# Altium schematic symbol library Capacitor.SchLib: 735 symbols (part 11 of 20)
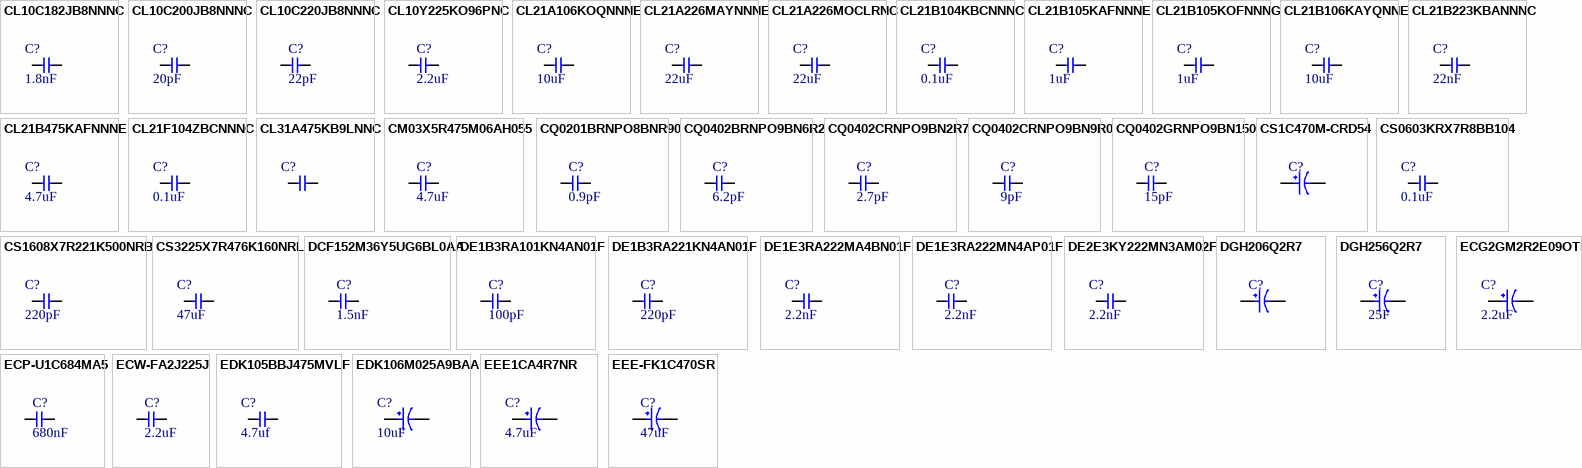
[diagram p28: symbols CL10C182JB8NNNC to EEE-FK1C470SR]

## CL31A475KB9LNNC
designator C?
CAP CER 4.7UF 50V X5R 1206; Manufacturer: Samsung; Manufacturer Part Number: CL31A475KB9LNNC; Tolerance: 10%; Item Type: Capacitor; Supplier: Avnet; Supplier Part Number: CL31A475KB9LNNC; RoHS: Yes; Category: Ceramic Capacitors; Stock: 176000; Pricing: 4000=0.09189, 8000=0.08978, 16000=0.08767, 24000=0.08555, 32000=0.08344 (USD); Mounting Technology: Surface Mount; Case/Package: Ceramic; Case Code (Metric): 3216; Case Code (Imperial): 1206; Min Operating Temperature: -55°C; Max Operating Temperature: 85°C; Packaging: Tape and Reel; Value: 4.7uF; Voltage Rating: 50V; Dielectric: X5R; Series: CL; Package Quantity: 1; Length: 3.2mm; Width: 0.063inch; Depth: 1.6mm; Thickness: 0.039inch; Radiation Hardening: No; RoHS Compliant: Yes; ComponentLink1URL: https://datasheet.ciiva.com/25727/cl31a475kb9lnnc-25727168.pdf?src-supplier=Digi-Key; ComponentLink1Description: https://datasheet.ciiva.com/25727/cl31a475kb9lnnc-25727168.pdf?src-supplier=Digi-Key; ComponentLink2URL: https://datasheet.ciiva.com/26838/getdatasheetpartid-359646-26838869.pdf?src-supplier=Verical; ComponentLink2Description: https://datasheet.ciiva.com/26838/getdatasheetpartid-359646-26838869.pdf?src-supplier=Verical; LCSC Part Number: C318753
footprint Cap-1206 (SMD 1206)
pins: 1, 2

## CM03X5R475M06AH055
designator C?, comment 4.7uF
CAP CER 4.7UF 6.3V X5R 0201; Manufacturer: Kyocera AVX; Manufacturer Part Number: CM03X5R475M06AH055; Item Type: Capacitor; Supplier: Arrow Electronics; Supplier Part Number: CM03X5R475M06AH055; RoHS: Yes; Category: Ceramic Capacitors; Stock: 1730; Pricing: 1=0.32, 10=0.216, 25=0.1842, 100=0.1171, 250=0.1159, 500=0.1132, 1000=0.0679 (USD); LCSC Part Number: C253012
footprint CAP-0201
pins: 1, 2

## CQ0201BRNPO8BNR90
designator C?, comment 0.9pF
CAP CER 0.9PF 25V C0G/NPO 0201; Manufacturer: Yageo; Manufacturer Part Number: CQ0201BRNPO8BNR90; Item Type: Capacitor; Supplier: Digikey; Supplier Part Number: 13-CQ0201BRNPO8BNR90TR-ND; RoHS: Yes; Category: Ceramic Capacitors; Pricing: 15000=0.01368 (USD); LCSC Part Number: C513692
footprint CAP-0201
pins: 1, 2

## CQ0402BRNPO9BN6R2
designator C?, comment 6.2pF
CAP CER 6.2PF 50V C0G/NPO 0402; Manufacturer: Yageo; Manufacturer Part Number: CQ0402BRNPO9BN6R2; Item Type: Capacitor; Supplier: Digikey; Supplier Part Number: 13-CQ0402BRNPO9BN6R2CT-ND; RoHS: Yes; Category: Ceramic Capacitors; Stock: 56222; Pricing: 1=0.18, 10=0.12, 50=0.0716, 100=0.0563, 500=0.04158, 1000=0.03443, 2500=0.03204, 5000=0.02932 (USD); Mounting Technology: Surface Mount; Case/Package: 0402; Min Operating Temperature: -55°C; Max Operating Temperature: 125°C; Packaging: Tape and Reel; Value: 6.2pF; Voltage Rating: 50V; Series: CQ; ComponentLink1URL: http://www.yageo.com/NewPortal/_en/search/productDocs.jsp?YageoPartNumber=CQ0402BRNPO9BN6R2&src-supplier=Digikey; ComponentLink1Description: http://www.yageo.com/NewPortal/_en/search/productDocs.jsp?YageoPartNumber=CQ0402BRNPO9BN6R2&src-supplier=Digikey; LCSC Part Number: C577385
footprint Cap-0402
pins: 1, 2

## CQ0402CRNPO9BN2R7
designator C?, comment 2.7pF
CAP CER 2.7PF 50V C0G/NPO 0402; Manufacturer: Yageo; Manufacturer Part Number: CQ0402CRNPO9BN2R7; Item Type: Capacitor; Supplier: Mouser; Supplier Part Number: 603-CQ0402CNPO9BN2R7; RoHS: No; Stock: 19985; Pricing: 1=0.1, 10=0.044, 50=0.044, 100=0.026, 1000=0.017, 10000=0.013 (USD); LCSC Part Number: C1855210
footprint Cap-0402
pins: 1, 2

## CQ0402CRNPO9BN9R0
designator C?, comment 9pF
CAP CER 9PF 50V C0G/NPO 0402; Manufacturer: Yageo; Manufacturer Part Number: CQ0402CRNPO9BN9R0; Item Type: Capacitor; Supplier: Digikey; Supplier Part Number: CQ0402CRNPO9BN9R0-ND; RoHS: Yes; Category: Ceramic Capacitors; Pricing: 10000=0.02594 (USD); Mounting Technology: Surface Mount; Case/Package: 0402; Min Operating Temperature: -55°C; Max Operating Temperature: 125°C; Packaging: Tape and Reel; Value: 9pF; Voltage Rating: 50V; Series: CQ; ComponentLink1URL: http://www.yageo.com/documents/recent/UPY-High%20Q_NP0_16V-to-250V_13.pdf?src-supplier=Digikey; ComponentLink1Description: http://www.yageo.com/documents/recent/UPY-High%20Q_NP0_16V-to-250V_13.pdf?src-supplier=Digikey; LCSC Part Number: C577403
footprint Cap-0402
pins: 1, 2

## CQ0402GRNPO9BN150
designator C?, comment 15pF
CAP CER 15PF 50V C0G/NPO 0402; Manufacturer: Yageo; Manufacturer Part Number: CQ0402GRNPO9BN150; Item Type: Capacitors; Tolerance: 2%; Dielectric: C0G; Supplier: Digikey; LCSC Part Number: C577406; RoHS: Yes; Pricing: 10000=0.04366 (USD); Mounting Technology: Surface Mount; Case/Package: 0402; Case Code (Imperial): 0402; Case Code (Metric): 1005; Weight: 2.3E-05oz; Min Operating Temperature: -55°C; Max Operating Temperature: 125°C; Value: 15pF; Packaging: Tape and Reel; Voltage Rating: 50V; Voltage Rating (DC): 50V; Package Quantity: 10000; Series: CQ; ComponentLink1URL: http://www.mouser.com/ds/2/447/UPY-High%20Q_NP0_16V-to-250V_11-533944.pdf?src-supplier=Mouser; ComponentLink1Description: http://www.mouser.com/ds/2/447/UPY-High%20Q_NP0_16V-to-250V_11-533944.pdf?src-supplier=Mouser; ComponentLink2URL: http://www.yageo.com/documents/recent/UPY-High%20Q_NP0_16V-to-250V_13.pdf?src-supplier=Digikey; ComponentLink2Description: http://www.yageo.com/documents/recent/UPY-High%20Q_NP0_16V-to-250V_13.pdf?src-supplier=Digikey
footprint Cap-0402
pins: 1, 2

## CS1C470M-CRD54
designator C?
47uF 16V ±20% SMD,D5xL5.4mm Aluminum Electrolytic Capacitors - SMD ROHS; Manufacturer: ST(Semtech); Manufacturer Part Number: CS1C470M-CRD54; Package: SMD,D5xL5.4mm; LCSC Part Number: C96178; Item Type: Capacitors; ComponentLink1Description: LCSC; ComponentLink1URL: https://www.lcsc.com/product-detail/Aluminum-Electrolytic-Capacitors-SMD_ST-Semtech-CS1C470M-CRD54_C96178.html
footprint CS1C470M-CRD54
pins: 1, 2

## CS0603KRX7R8BB104
designator C?, comment 0.1uF
CS Series 0603 0.1 uF 25 V ±10% X7R Multilayer Ceramic Capacitor; Manufacturer: Yageo; Manufacturer Part Number: CS0603KRX7R8BB104; Item Type: Capacitors; Supplier: Avnet; LCSC Part Number: C577419; RoHS: Yes; Stock: 3200; Pricing: 1=0.133, 25=0.092, 50=0.069, 100=0.047 (USD); ComponentLink1URL: https://www.yageo.com/upload/media/product/productsearch/datasheet/mlcc/UPY-ST_NPOX7R_16V-to-3KV_5.pdf?src-supplier=Digi-Key; ComponentLink1Description: https://www.yageo.com/upload/media/product/productsearch/datasheet/mlcc/UPY-ST_NPOX7R_16V-to-3KV_5.pdf?src-supplier=Digi-Key; ComponentLink2URL: https://datasheet.octopart.com/CS0603KRX7R8BB104-Yageo-datasheet-158410602.pdf?src-supplier=Future+Electronics; ComponentLink2Description: https://datasheet.octopart.com/CS0603KRX7R8BB104-Yageo-datasheet-158410602.pdf?src-supplier=Future+Electronics
footprint Cap-0603
pins: 1, 2

## CS1608X7R221K500NRB
designator C?, comment 220pF
50V 220pF X7R ±10% 0603 Multilayer Ceramic Capacitors MLCC - SMD/SMT ROHS; Manufacturer: Samwha Capacitors; Manufacturer Part Number: CS1608X7R221K500NRB; Package: 0603; LCSC Part Number: C5255295; Item Type: Capacitor; ComponentLink1Description: LCSC; ComponentLink1URL: https://www.lcsc.com/product-detail/Multilayer-Ceramic-Capacitors-MLCC-SMD-SMT_Samwha-Capacitor-CS1608X7R221K500NRB_C5255295.html
footprint Cap-0603
pins: 1, 2

## CS3225X7R476K160NRL
designator C?, comment 47uF
16V 47uF X7R ±10% 1210 Multilayer Ceramic Capacitors MLCC - SMD/SMT ROHS; Manufacturer: Samwha Capacitor; Manufacturer part Number: CS3225X7R476K160NRL; Package: 1210; LCSC Part Number: C5440143; Item Type: Capacitor; ComponentLink1Description: LCSC; ComponentLink1URL: https://www.lcsc.com/product-detail/Multilayer-Ceramic-Capacitors-MLCC-SMD-SMT_Samwha-Capacitor-CS3225X7R476K160NRL_C5440143.html
footprint Cap-1210 (SMD 1210)
pins: 1, 2

## DCF152M36Y5UG6BL0AA
designator C?, comment 1.5nF
1.5nF ±20% X1,Y1 Plugin,P=10mm Safety Capacitors ROHS; Manufacturer: SHM; Manufacturer Part Number: DCF152M36Y5UG6BL0AA; Package: Plugin,P=10mm; LCSC Part Number: C2919099; Item Type: Capacitor; ComponentLink1Description: LCSC; ComponentLink1URL: https://www.lcsc.com/product-detail/Safety-Capacitors_SHM-DCF152M36Y5UG6BL0AA_C2919099.html?s_z=n_DE2E3KY152MN3AM02F
footprint DCF152M36Y5UG6BL0AA
pins: 1, 2

## DE1B3RA101KN4AN01F
designator C?, comment 100pF
CAP CER 100PF 250V RADIAL; Manufacturer: Murata; Manufacturer Part Number: DE1B3RA101KN4AN01F; Item Type: Capacitors; Material: 4241ConductorMaterial; Supplier: Mouser; LCSC Part Number: C3285641; RoHS: Yes; Stock: 583; Pricing: 1=0.3, 10=0.147, 50=0.147, 100=0.123, 1000=0.089, 10000=0.061 (USD); Height: 9mm; ComponentLink1URL: https://search.murata.co.jp/Ceramy/image/img/A01X/G101/ENG/DE1_RA_N01F_E.pdf?src-supplier=Digikey; ComponentLink1Description: https://search.murata.co.jp/Ceramy/image/img/A01X/G101/ENG/DE1_RA_N01F_E.pdf?src-supplier=Digikey
footprint DE1B3RA101KN4AN01F
pins: 1, 2

## DE1B3RA221KN4AN01F
designator C?, comment 220pF
CAP CER 220PF 250V RADIAL; Manufacturer: Murata; Manufacturer Part Number: DE1B3RA221KN4AN01F; Item Type: Suppression Capacitor; Supplier: Mouser; LCSC Part Number: C1622503; RoHS: Yes; Stock: 985; Pricing: 1=0.35, 10=0.168, 50=0.168, 100=0.141, 1000=0.107, 10000=0.069 (USD); ComponentLink1URL: https://search.murata.co.jp/Ceramy/image/img/A01X/G101/ENG/DE1_RA_N01F_E.pdf?src-supplier=Digikey; ComponentLink1Description: https://search.murata.co.jp/Ceramy/image/img/A01X/G101/ENG/DE1_RA_N01F_E.pdf?src-supplier=Digikey
footprint DE1B3RA221KN4AN01F
pins: 1, 2

## DE1E3RA222MA4BN01F
designator C?, comment 2.2nF
2200 pF ±20% 250VAC Ceramic Capacitor E Radial, Disc; Manufacturer: Murata; Manufacturer Part Number: DE1E3RA222MA4BN01F; Item Type: Capacitors; Supplier: Mouser; LCSC Part Number: C343981; RoHS: Yes; Stock: 37677; Pricing: 1=0.42, 10=0.271, 50=0.271, 100=0.146, 1000=0.114, 10000=0.097 (USD); ComponentLink1URL: http://www.farnell.com/datasheets/2608335.pdf?src-supplier=Farnell; ComponentLink1Description: http://www.farnell.com/datasheets/2608335.pdf?src-supplier=Farnell; ComponentLink2URL: http://www.farnell.com/datasheets/2608335.pdf?src-supplier=Newark; ComponentLink2Description: http://www.farnell.com/datasheets/2608335.pdf?src-supplier=Newark; ComponentLink3URL: https://datasheet.octopart.com/DE1E3RA222MA4BN01F-Murata-datasheet-166166226.pdf?src-supplier=TME; ComponentLink3Description: https://datasheet.octopart.com/DE1E3RA222MA4BN01F-Murata-datasheet-166166226.pdf?src-supplier=TME
footprint DE1E3RA222MA4BN01F
pins: 1, 2

## DE1E3RA222MN4AP01F
designator C?, comment 2.2nF
CAP CER 2200PF 1.5KV RADIAL; Manufacturer: Murata; Manufacturer Part Number: DE1E3RA222MN4AP01F; Item Type: Capacitors; Supplier: Future Electronics; LCSC Part Number: C1622500; RoHS: Yes; Stock: 1200; Pricing: 600=0.0835, 2400=0.0795, 9000=0.0758, 18000=0.074, 45000=0.0699 (USD); ComponentLink1URL: https://search.murata.co.jp/Ceramy/image/img/A01X/G101/ENG/DE1_RA_P01F_E.pdf?src-supplier=Digikey; ComponentLink1Description: https://search.murata.co.jp/Ceramy/image/img/A01X/G101/ENG/DE1_RA_P01F_E.pdf?src-supplier=Digikey; ComponentLink2URL: http://search.murata.co.jp/Ceramy/image/img/A01X/G101/ENG/DE1_RA_P01F_E.pdf?src-supplier=Digikey; ComponentLink2Description: http://search.murata.co.jp/Ceramy/image/img/A01X/G101/ENG/DE1_RA_P01F_E.pdf?src-supplier=Digikey
footprint DE1E3RA222MN4AP01F
pins: 1, 2

## DE2E3KY222MN3AM02F
designator C?, comment 2.2nF
Cap Ceramic 0.0022uF 250Vac E 20% (8 X 5mm) Radial 7.5mm 125°C Ammo Pack; Manufacturer: Murata; Manufacturer Part Number: DE2E3KY222MN3AM02F; Item Type: Suppression Capacitor; Supplier: Arrow Electronics; Supplier Part Number: DE2E3KY222MN3AM02F; RoHS: Yes; Category: Ceramic Capacitors; Stock: 539100; Pricing: 900=4.7232 (USD); ComponentLink1URL: https://datasheet.ciiva.com/29537/c85e-29537334.pdf?src-supplier=Digi-Key; ComponentLink1Description: https://datasheet.ciiva.com/29537/c85e-29537334.pdf?src-supplier=Digi-Key; ComponentLink2URL: https://datasheet.ciiva.com/41797/l0015e-41797477.pdf?src-supplier=Digi-Key; ComponentLink2Description: https://datasheet.ciiva.com/41797/l0015e-41797477.pdf?src-supplier=Digi-Key; LCSC Part Number: C96464
footprint DE2E3KY222MN3AM02F
pins: 1, 2

## DGH206Q2R7
designator C?
CAPACITOR 20F -10%, +30% 2.7V TH; Manufacturer: Cornell Dubilier; Manufacturer Part Number: DGH206Q2R7; Supplier: Digikey; Supplier Part Number: 338-DGH206Q2R7-ND; RoHS: No; Item Type: Capacitor; Pricing: 1=4.21, 10=2.81, 50=2.2436, 100=2.0669, 500=1.76504, 1000=1.67062, 2500=1.57019, 5000=1.50919 (USD)
footprint DGH206Q2R7
pins: 1, 2

## DGH256Q2R7
designator C?, comment 25F
CAPACITOR 25F -10%, +30% 2.7V TH; Manufacturer: CDE Illinois Capacitor; Manufacturer Part Number: DGH256Q2R7; Supplier: Arrow Electronics; Supplier Part Number: DGH256Q2R7; RoHS: Yes; Item Type: Capacitor; Pricing: 100=3.433, 4500=1.646 (USD); ComponentLink1URL: https://www.cde.com/resources/catalogs/DGH-series.pdf?src-supplier=Digikey; ComponentLink1Description: https://www.cde.com/resources/catalogs/DGH-series.pdf?src-supplier=Digikey
footprint DGH256Q2R7
pins: 1, 2

## ECG2GM2R2E09OTBO
designator C?, comment 2.2uF
2.2uF 400V ±20% 70mA@100kHz Plugin,D6.3xL9mm Aluminum Electrolytic Capacitors - Leaded ROHS; Manufacturer: Yunxing; Manufacturer Part Number: ECG2GM2R2E09OTBO; Package: Plugin,D6.3xL9mm; LCSC Part Number: C525475; Item Type: Capacitor; ComponentLink1Description: LCSC; ComponentLink1URL: https://www.lcsc.com/product-detail/Aluminum-Electrolytic-Capacitors-Leaded_Yunxing-ECG2GM2R2E09OTBO_C525475.html
footprint ECG2GM2R2E09OTBO
pins: 1, 2

## ECP-U1C684MA5
designator C?, comment 680nF
CAP FILM 0.68UF 20% 16VDC 1206; Manufacturer: Panasonic; Manufacturer Part Number: ECP-U1C684MA5; Item Type: Capacitors; Voltage Rating (AC): 16V; Supplier: Future Electronics; LCSC Part Number: C569898; RoHS: Yes; Stock: 2000; Pricing: 2000=0.275, 4000=0.27, 6000=0.27, 8000=0.265 (USD); ComponentLink1URL: https://datasheet.ciiva.com/15225/getdatasheetpartid-259011-15225611.pdf?src-supplier=Verical; ComponentLink1Description: https://datasheet.ciiva.com/15225/getdatasheetpartid-259011-15225611.pdf?src-supplier=Verical; ComponentLink2URL: https://datasheet.ciiva.com/5710/31740-5710144.pdf?src-supplier=Farnell; ComponentLink2Description: https://datasheet.ciiva.com/5710/31740-5710144.pdf?src-supplier=Farnell; ComponentLink3URL: https://datasheet.ciiva.com/11792/0900766b80f2ea72-11792215.pdf?src-supplier=Rs; ComponentLink3Description: https://datasheet.ciiva.com/11792/0900766b80f2ea72-11792215.pdf?src-supplier=Rs; ComponentLink4URL: https://datasheet.ciiva.com/30243/abd0000ce12-30243739.pdf?src-supplier=Onlinecomponents.com; ComponentLink4Description: https://datasheet.ciiva.com/30243/abd0000ce12-30243739.pdf?src-supplier=Onlinecomponents.com; ComponentLink5URL: https://datasheet.ciiva.com/16397/abd0000ce12-16397064.pdf?src-supplier=Future+Electronics; ComponentLink5Description: https://datasheet.ciiva.com/16397/abd0000ce12-16397064.pdf?src-supplier=Future+Electronics; ComponentLink6URL: https://datasheet.ciiva.com/46399/31740-46399767.pdf?src-supplier=Element14; ComponentLink6Description: https://datasheet.ciiva.com/46399/31740-46399767.pdf?src-supplier=Element14; ComponentLink7URL: https://datasheet.ciiva.com/46400/31740-46400041.pdf?src-supplier=Element14; ComponentLink7Description: https://datasheet.ciiva.com/46400/31740-46400041.pdf?src-supplier=Element14; ComponentLink8URL: https://datasheet.ciiva.com/2993/abd0000ce12-2993739.pdf?src-supplier=Avnet; ComponentLink8Description: https://datasheet.ciiva.com/2993/abd0000ce12-2993739.pdf?src-supplier=Avnet
footprint Cap-1206 (SMD 1206)
pins: 1, 2

## ECW-FA2J225J
designator C?, comment 2.2uF
CAP FILM 2.2UF 5% 630VDC RADIAL; Manufacturer: Panasonic; Manufacturer Part Number: ECW-FA2J225J; Item Type: Capacitors; Dielectric Material: PP; Voltage Rating (DC): 630V; Supplier: Mouser; Supplier Part Number: 667-ECW-FA2J225J; RoHS: Yes; Stock: 55; Pricing: 1=1.91, 10=1.33, 50=1.07, 100=0.965, 1000=0.75, 10000=0.75 (USD); Mounting Technology: Through Hole; Case/Package: Radial; Min Operating Temperature: -40°C; Max Operating Temperature: 105°C; Value: 2.2uF; Tolerance: 5%; Packaging: Bulk; Package Quantity: 400; Termination: PC Pins; Dielectric: PP; Series: ECW-F(A); Voltage Rating: 630V; Length: 26mm; Width: 16.3mm; Height: 21.4mm; Lead Pitch: 22.5mm; Reach SVHC Compliant: Unknown; ComponentLink1URL: https://datasheet.ciiva.com/15908/abd0000ce47-15908716.pdf?src-supplier=Onlinecomponents.com; ComponentLink1Description: https://datasheet.ciiva.com/15908/abd0000ce47-15908716.pdf?src-supplier=Onlinecomponents.com; ComponentLink2URL: https://datasheet.ciiva.com/30167/44abd0000ce47-30167191.pdf?src-supplier=Onlinecomponents.com; ComponentLink2Description: https://datasheet.ciiva.com/30167/44abd0000ce47-30167191.pdf?src-supplier=Onlinecomponents.com; ComponentLink3URL: https://datasheet.ciiva.com/6282/abd0000ce47-6282218.pdf?src-supplier=Digikey; ComponentLink3Description: https://datasheet.ciiva.com/6282/abd0000ce47-6282218.pdf?src-supplier=Digikey
footprint ECW-FA2J225J
pins: 1, 2

## EDK105BBJ475MVLF
designator C?, comment 4.7uf
16V 4.7uF ±20% 0402 Multilayer Ceramic Capacitors; Manufacturer: Taiyo Yuden; Manufacturer Part Number: EDK105BBJ475MVLF; LCSC Part Number: C412302; Item Type: Capacitor; ComponentLink1Description: LCSC; ComponentLink1URL: https://www.lcsc.com/product-detail/Multilayer-Ceramic-Capacitors-MLCC-SMD-SMT_Taiyo-Yuden-EDK105BBJ475MVLF_C412302.html
footprint Cap-0402
pins: 1, 2

## EDK106M025A9BAA
designator C?, comment 10uF
CAP ALUM 10UF 20% 25V SMD; Manufacturer: KEMET; Manufacturer Part Number: EDK106M025A9BAA; Dielectric Material: Aluminium; Ripple Current: 10mA; Life (Hours): 2000Hour; Leakage Current: 3uA; Dissipation Factor: 0.14%; Polarity: Polar; Lead Length: 1.8mm; Supplier 1: Digi-Key; Stock 1: 9371; Pricing 1: 1=0.33, 10=0.225, 50=0.15, 100=0.1275, 500=0.08998, 1000=0.07873 (USD); Mount: Surface Mount,PCB; Case/Package: Radial; Min Operating Temperature: -40°C; Max Operating Temperature: 85°C; Package Quantity: 2000; Capacitance: 10uF; Voltage Rating: 25V; Tolerance: 20%; Packaging: Tape and Reel; Voltage Rating (DC): 25V; Termination: SMD/SMT; Series: EDK; Voltage: 25V; Diameter: 4mm; Length: 5.4mm; Height: 5.4mm; Height - Seated (Max): 0.217inch; Lead Pitch: 1mm; RoHS Compliant: Yes; REACH SVHC: No SVHC; ComponentLink1URL: https://api.kemet.com/component-edge/download/datasheet/EDK106M025A9BAA.pdf?src-supplier=Digi-Key; ComponentLink1Description: https://api.kemet.com/component-edge/download/datasheet/EDK106M025A9BAA.pdf?src-supplier=Digi-Key; ComponentLink2URL: https://www.alliedelec.com/m/d/48a492d9821943f3a399faec33a8c847.pdf?src-supplier=Allied+Electronics; ComponentLink2Description: https://www.alliedelec.com/m/d/48a492d9821943f3a399faec33a8c847.pdf?src-supplier=Allied+Electronics; ComponentLink3URL: http://www.mouser.com/ds/2/212/KEM_A4001_EDK-535350.pdf?src-supplier=Mouser; ComponentLink3Description: http://www.mouser.com/ds/2/212/KEM_A4001_EDK-535350.pdf?src-supplier=Mouser; Supplier Part Number 1: 399-6048-1-ND; LCSC Part Number: C1984940
footprint EDK106M025A9BAA_
pins: 1, 2

## EEE1CA4R7NR
designator C?, comment 4.7uF
CAP ALUM 4.7UF 20% 16V SMD; Manufacturer: Panasonic; Manufacturer Part Number: EEE-1CA4R7NR; Ripple Current: 20mA; Leakage Current: 6uA; Life (Hours): 2000Hour; Dissipation Factor: 0.32%; Supplier 1: RSComponents; RoHS: Yes; Category: Aluminum Electrolytic Capacitors; Stock 1: 200; Pricing 1: 2000=0.14500, 6000=0.13800 (GBP); Mount: Surface Mount,PCB; Case/Package: Radial; Min Operating Temperature: -40°C; Max Operating Temperature: 85°C; Packaging: Tape and Reel; Capacitance: 4.7uF; Tolerance: 20%; Voltage Rating: 16V; Package Quantity: 1; Voltage Rating (DC): 16V; Termination: SMD/SMT; Series: S; Construction: Cylindrical; Ripple Current (AC): 20mA; Diameter: 4mm; Length: 5.5mm; Width: 650um; Height: 5.4mm; Height - Seated (Max): 0.213inch; Radiation Hardening: No; RoHS Compliant: Yes; REACH SVHC: No SVHC; Lead Free: Lead Free; ComponentLink1URL: https://datasheet.ciiva.com/43470/aba0000ce2-43470646.pdf?src-supplier=Farnell; ComponentLink1Description: https://datasheet.ciiva.com/43470/aba0000ce2-43470646.pdf?src-supplier=Farnell; ComponentLink2URL: https://datasheet.ciiva.com/46378/aba0000ce2-46378303.pdf?src-supplier=Element14; ComponentLink2Description: https://datasheet.ciiva.com/46378/aba0000ce2-46378303.pdf?src-supplier=Element14; ComponentLink3URL: https://datasheet.ciiva.com/31414/aba0000ce2-31414654.pdf?src-supplier=Farnell; ComponentLink3Description: https://datasheet.ciiva.com/31414/aba0000ce2-31414654.pdf?src-supplier=Farnell; ComponentLink4URL: https://datasheet.ciiva.com/24027/aba0000ce2-40801-24027029.pdf?src-supplier=Mouser; ComponentLink4Description: https://datasheet.ciiva.com/24027/aba0000ce2-40801-24027029.pdf?src-supplier=Mouser; ComponentLink5URL: https://datasheet.ciiva.com/14598/70255710-14598216.pdf?src-supplier=Allied+Electronics; ComponentLink5Description: https://datasheet.ciiva.com/14598/70255710-14598216.pdf?src-supplier=Allied+Electronics; ComponentLink6URL: https://datasheet.ciiva.com/14593/70255710-14593756.pdf?src-supplier=Allied+Electronics; ComponentLink6Description: https://datasheet.ciiva.com/14593/70255710-14593756.pdf?src-supplier=Allied+Electronics; Supplier Part Number 1: 1763742; LCSC Part Number: C401604
footprint EEE1CA4R7NR_
pins: 1, 2

## EEE-FK1C470SR
designator C?, comment 47uF
CAP ALUM 47UF 20% 16V SMD; Manufacturer: Panasonic; Manufacturer Part Number: EEE-FK1C470SR; Item Type: Capacitors; ESR (Equivalent Series Resistance): 1.35R; Supplier: Mouser; LCSC Part Number: C401706; RoHS: No; Stock: 10391; Pricing: 1=0.5, 10=0.246, 50=0.246, 100=0.155, 1000=0.125, 10000=0.098 (USD); Mounting Technology: Surface Mount; Case/Package: Radial; Min Operating Temperature: -55°C; Max Operating Temperature: 105°C; Packaging: Cut Tape; Value: 47uF; Tolerance: 20%; Voltage Rating: 16V; Series: FKS; Ratings: AEC-Q200; ComponentLink1URL: https://media.digikey.com/pdf/Data%20Sheets/Panasonic%20Semiconductors%20ICs%20PDFs/FKS_Series_small_LE_NPI.pdf?src-supplier=Digikey; ComponentLink1Description: https://media.digikey.com/pdf/Data%20Sheets/Panasonic%20Semiconductors%20ICs%20PDFs/FKS_Series_small_LE_NPI.pdf?src-supplier=Digikey; ComponentLink2URL: https://datasheet.octopart.com/EEE-FK1C470SR-Panasonic-datasheet-102492114.pdf?src-supplier=Farnell; ComponentLink2Description: https://datasheet.octopart.com/EEE-FK1C470SR-Panasonic-datasheet-102492114.pdf?src-supplier=Farnell; ComponentLink3URL: https://industrial.panasonic.com/cdbs/www-data/pdf/RDE0000/ABA0000C1251.pdf?src-supplier=Digikey; ComponentLink3Description: https://industrial.panasonic.com/cdbs/www-data/pdf/RDE0000/ABA0000C1251.pdf?src-supplier=Digikey; ComponentLink4URL: https://b2b-api.panasonic.eu/file_stream/pids/fileversion/3102?src-supplier=Digikey; ComponentLink4Description: https://b2b-api.panasonic.eu/file_stream/pids/fileversion/3102?src-supplier=Digikey; ComponentLink5URL: https://datasheet.octopart.com/EEEFK1C470SR-Panasonic-datasheet-150469823.pdf?src-supplier=TME; ComponentLink5Description: https://datasheet.octopart.com/EEEFK1C470SR-Panasonic-datasheet-150469823.pdf?src-supplier=TME
footprint EEE-FK1C470SR
pins: 1, 2

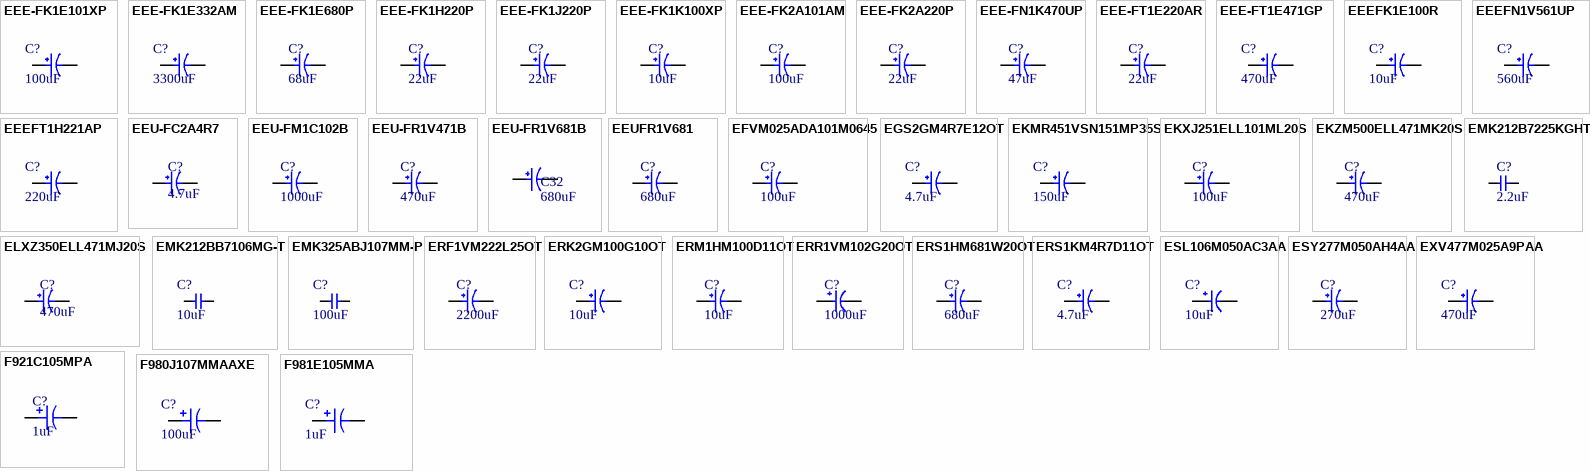
[diagram p10: symbols EEE-FK1E101XP to F981E105MMA]

## EEE-FK1E101XP
designator C?, comment 100uF
CAP ALUM 100UF 20% 25V SMD; Manufacturer: Panasonic; Manufacturer Part Number: EEE-FK1E101XP; Item Type: Capacitor; Ripple Current: 280mA; ESR (Equivalent Series Resistance): 340mR; Life (Hours): 2000Hour; Leakage Current: 3uA; Lead Diameter: 0.65mm; Supplier: Mouser; LCSC Part Number: C128510; RoHS: Yes; Stock: 18001; Pricing: 1=0.56, 10=0.293, 50=0.293, 100=0.263, 1000=0.168, 10000=0.147 (USD); Mounting Technology: Surface Mount,PCB; Case/Package: Radial; Pins: 8; Min Operating Temperature: -55°C; Max Operating Temperature: 105°C; Tolerance: 20%; Value: 100uF; Voltage Rating (DC): 25V; Packaging: Tape and Reel; Voltage Rating: 25V; Ripple Current (AC): 280mA; Impedance: 340mR; Package Quantity: 1; Termination: SMD/SMT; Voltage: 25V; Series: FK; Construction: Cylindrical; Diameter: 6.3mm; Length: 7.7mm; Width: 7.8mm; Height: 7.7mm; Lead Pitch: 1.8mm; Height - Seated (Max): 0.303inch; Ratings: AEC-Q200; Radiation Hardening: No; Reach SVHC Compliant: No; RoHS Compliant: Yes; Lead Free: 5697LeadFree; ComponentLink1URL: https://datasheet.ciiva.com/11777/0900766b80e4e8b0-11777232.pdf?src-supplier=Rs; ComponentLink1Description: https://datasheet.ciiva.com/11777/0900766b80e4e8b0-11777232.pdf?src-supplier=Rs; ComponentLink2URL: https://datasheet.ciiva.com/2983/aba0000ce120-2983949.pdf?src-supplier=Avnet; ComponentLink2Description: https://datasheet.ciiva.com/2983/aba0000ce120-2983949.pdf?src-supplier=Avnet; ComponentLink3URL: https://datasheet.ciiva.com/46386/1676921-46386184.pdf?src-supplier=Element14; ComponentLink3Description: https://datasheet.ciiva.com/46386/1676921-46386184.pdf?src-supplier=Element14; ComponentLink4URL: https://datasheet.ciiva.com/46376/1676921-46376486.pdf?src-supplier=Element14; ComponentLink4Description: https://datasheet.ciiva.com/46376/1676921-46376486.pdf?src-supplier=Element14; ComponentLink5URL: https://datasheet.ciiva.com/43463/58258-43463513.pdf?src-supplier=Farnell; ComponentLink5Description: https://datasheet.ciiva.com/43463/58258-43463513.pdf?src-supplier=Farnell; ComponentLink6URL: https://datasheet.ciiva.com/46386/58258-46386183.pdf?src-supplier=Element14; ComponentLink6Description: https://datasheet.ciiva.com/46386/58258-46386183.pdf?src-supplier=Element14; ComponentLink7URL: https://datasheet.ciiva.com/28678/731857-28678871.pdf?src-supplier=Element14; ComponentLink7Description: https://datasheet.ciiva.com/28678/731857-28678871.pdf?src-supplier=Element14; ComponentLink8URL: https://datasheet.ciiva.com/24023/aba0000ce120-24023434.pdf?src-supplier=Mouser; ComponentLink8Description: https://datasheet.ciiva.com/24023/aba0000ce120-24023434.pdf?src-supplier=Mouser; ComponentLink9URL: https://datasheet.ciiva.com/14594/70258115-14594399.pdf?src-supplier=Allied+Electronics; ComponentLink9Description: https://datasheet.ciiva.com/14594/70258115-14594399.pdf?src-supplier=Allied+Electronics; ComponentLink10URL: https://datasheet.ciiva.com/2983/aba0000ce120-2983950.pdf?src-supplier=Avnet; ComponentLink10Description: https://datasheet.ciiva.com/2983/aba0000ce120-2983950.pdf?src-supplier=Avnet; ComponentLink11URL: https://datasheet.ciiva.com/16449/aba0000ce120-16449109.pdf?src-supplier=Future+Electronics; ComponentLink11Description: https://datasheet.ciiva.com/16449/aba0000ce120-16449109.pdf?src-supplier=Future+Electronics
footprint EEE-FK1E101XP
pins: 1, 2

## EEE-FK1E332AM
designator C?, comment 3300uF
CAP ALUM 3300UF 20% 25V SMD; Manufacturer: Panasonic; Manufacturer Part Number: EEE-FK1E332AM; Ripple Current: 2.06A; Value: 3.3mF; Impedance: 33mR; Polarity: Polar; Life (Hours): 5000Hour; Dissipation Factor: 0.18%; Item Type: Capacitor; Supplier 1: Rs; RoHS: Yes; Category: Aluminum Electrolytic Capacitors; Stock 1: 105; Pricing 1: 1=3.50000, 25=3.22000, 50=2.95000, 100=2.69000, 250=2.49000 (GBP); Mounting Technology: Surface Mount,PCB; Case/Package: Radial; Contact Plating: Tin; Min Operating Temperature: -55°C; Max Operating Temperature: 105°C; Packaging: Tape and Reel; Tolerance: 20%; Voltage Rating: 25V; Package Quantity: 125; Voltage Rating (DC): 25V; ESR (Equivalent Series Resistance): 33mR; Ripple Current (AC): 2.06A; Termination: SMD/SMT; Voltage: 25V; Series: FK; Construction: Cylindrical; Diameter: 18mm; Length: 16.5mm; Height: 16.5mm; Height - Seated (Max): 0.669inch; Ratings: AEC-Q200; Radiation Hardening: No; RoHS Compliant: Yes; Reach SVHC Compliant: Yes; Lead Free: Lead Free; ComponentLink1URL: https://datasheet.ciiva.com/11783/0900766b80e4e801-11783521.pdf?src-supplier=Rs; ComponentLink1Description: https://datasheet.ciiva.com/11783/0900766b80e4e801-11783521.pdf?src-supplier=Rs; ComponentLink2URL: https://datasheet.ciiva.com/48524/fk-large-eng-tds-48524618.pdf?src-supplier=Distrelec; ComponentLink2Description: https://datasheet.ciiva.com/48524/fk-large-eng-tds-48524618.pdf?src-supplier=Distrelec; ComponentLink3URL: https://datasheet.ciiva.com/43470/1726499-43470719.pdf?src-supplier=Farnell; ComponentLink3Description: https://datasheet.ciiva.com/43470/1726499-43470719.pdf?src-supplier=Farnell; ComponentLink4URL: https://datasheet.ciiva.com/46378/1726499-46378361.pdf?src-supplier=Element14; ComponentLink4Description: https://datasheet.ciiva.com/46378/1726499-46378361.pdf?src-supplier=Element14; ComponentLink5URL: https://datasheet.ciiva.com/31418/1726499-31418313.pdf?src-supplier=Farnell; ComponentLink5Description: https://datasheet.ciiva.com/31418/1726499-31418313.pdf?src-supplier=Farnell; ComponentLink6URL: https://datasheet.ciiva.com/46372/1726499-46372278.pdf?src-supplier=Element14; ComponentLink6Description: https://datasheet.ciiva.com/46372/1726499-46372278.pdf?src-supplier=Element14; ComponentLink7URL: https://datasheet.ciiva.com/24023/aba0000ce120-24023054.pdf?src-supplier=Mouser; ComponentLink7Description: https://datasheet.ciiva.com/24023/aba0000ce120-24023054.pdf?src-supplier=Mouser; ComponentLink8URL: https://datasheet.ciiva.com/14595/70256466-14595150.pdf?src-supplier=Allied+Electronics; ComponentLink8Description: https://datasheet.ciiva.com/14595/70256466-14595150.pdf?src-supplier=Allied+Electronics; ComponentLink9URL: https://datasheet.ciiva.com/2985/aba0000ce88-2985426.pdf?src-supplier=Avnet; ComponentLink9Description: https://datasheet.ciiva.com/2985/aba0000ce88-2985426.pdf?src-supplier=Avnet; ComponentLink10URL: https://datasheet.ciiva.com/2985/aba0000ce88-2985427.pdf?src-supplier=Avnet; ComponentLink10Description: https://datasheet.ciiva.com/2985/aba0000ce88-2985427.pdf?src-supplier=Avnet; ComponentLink11URL: https://datasheet.ciiva.com/30135/aba0000ce88-30135197.pdf?src-supplier=Onlinecomponents.com; ComponentLink11Description: https://datasheet.ciiva.com/30135/aba0000ce88-30135197.pdf?src-supplier=Onlinecomponents.com; Supplier Part Number 1: 7083897; LCSC Part Number: C178544
footprint EEEFK1E332AM
pins: 1, 2

## EEE-FK1E680P
designator C?, comment 68uF
CAP ALUM 68UF 20% 25V SMD; Manufacturer: Panasonic; Manufacturer Part Number: EEE-FK1E680P; Item Type: Capacitor; Material: Aluminium; Ripple Current: 240mA; Life (Hours): 2000Hour; Impedance: 360mR; Leakage Current: 3uA; Lead Diameter: 0.65mm; Supplier: Mouser; LCSC Part Number: C336242; RoHS: Yes; Stock: 7162; Pricing: 1=0.44, 10=0.209, 50=0.209, 100=0.15, 1000=0.12, 10000=0.1 (USD); Mounting Technology: Surface Mount,PCB; Case/Package: Radial; Pins: 2; Min Operating Temperature: -55°C; Max Operating Temperature: 105°C; Value: 68uF; Tolerance: 20%; Packaging: Tape and Reel; Termination: SMD/SMT; Series: FK; Construction: Cylindrical; Voltage Rating: 25V; Ripple Current (AC): 240mA; Voltage Rating (DC): 25V; ESR (Equivalent Series Resistance): 360mR; Package Quantity: 1000; Voltage: 25V; Diameter: 6.3mm; Length: 5.8mm; Width: 7.8mm; Height: 5.8mm; Lead Pitch: 1.8mm; Ratings: AEC-Q200; Radiation Hardening: No; Reach SVHC Compliant: No; Lead Free: Lead Free; RoHS Compliant: Yes; ComponentLink1URL: https://datasheet.ciiva.com/11777/0900766b80e4e8b0-11777398.pdf?src-supplier=Rs; ComponentLink1Description: https://datasheet.ciiva.com/11777/0900766b80e4e8b0-11777398.pdf?src-supplier=Rs; ComponentLink2URL: https://datasheet.ciiva.com/29313/443469-da-01-en-smd-elko-vfk-d-68-uf-25v-29313567.pdf?src-supplier=Conrad; ComponentLink2Description: https://datasheet.ciiva.com/29313/443469-da-01-en-smd-elko-vfk-d-68-uf-25v-29313567.pdf?src-supplier=Conrad; ComponentLink3URL: https://datasheet.ciiva.com/43458/1676921-43458431.pdf?src-supplier=Farnell; ComponentLink3Description: https://datasheet.ciiva.com/43458/1676921-43458431.pdf?src-supplier=Farnell; ComponentLink4URL: https://datasheet.ciiva.com/6059/1676921-6059990.pdf?src-supplier=Farnell; ComponentLink4Description: https://datasheet.ciiva.com/6059/1676921-6059990.pdf?src-supplier=Farnell; ComponentLink5URL: https://datasheet.ciiva.com/46376/1676921-46376456.pdf?src-supplier=Element14; ComponentLink5Description: https://datasheet.ciiva.com/46376/1676921-46376456.pdf?src-supplier=Element14; ComponentLink6URL: https://datasheet.ciiva.com/28678/731857-28678902.pdf?src-supplier=Element14; ComponentLink6Description: https://datasheet.ciiva.com/28678/731857-28678902.pdf?src-supplier=Element14; ComponentLink7URL: https://datasheet.ciiva.com/24025/aba0000ce120-24025195.pdf?src-supplier=Mouser; ComponentLink7Description: https://datasheet.ciiva.com/24025/aba0000ce120-24025195.pdf?src-supplier=Mouser; ComponentLink8URL: https://datasheet.ciiva.com/14606/70258115-14606377.pdf?src-supplier=Allied+Electronics; ComponentLink8Description: https://datasheet.ciiva.com/14606/70258115-14606377.pdf?src-supplier=Allied+Electronics; ComponentLink9URL: https://datasheet.ciiva.com/14602/70258115-14602777.pdf?src-supplier=Allied+Electronics; ComponentLink9Description: https://datasheet.ciiva.com/14602/70258115-14602777.pdf?src-supplier=Allied+Electronics; ComponentLink10URL: https://datasheet.ciiva.com/48524/fk-eng-tds-48524141.pdf?src-supplier=Distrelec; ComponentLink10Description: https://datasheet.ciiva.com/48524/fk-eng-tds-48524141.pdf?src-supplier=Distrelec; ComponentLink11URL: https://datasheet.ciiva.com/46388/1676921-46388422.pdf?src-supplier=Element14; ComponentLink11Description: https://datasheet.ciiva.com/46388/1676921-46388422.pdf?src-supplier=Element14; ComponentLink12URL: https://datasheet.ciiva.com/16201/aba0000ce120-16201529.pdf?src-supplier=Future+Electronics; ComponentLink12Description: https://datasheet.ciiva.com/16201/aba0000ce120-16201529.pdf?src-supplier=Future+Electronics; ComponentLink13URL: https://datasheet.ciiva.com/15166/getdatasheetpartid-169293-15166167.pdf?src-supplier=Verical; ComponentLink13Description: https://datasheet.ciiva.com/15166/getdatasheetpartid-169293-15166167.pdf?src-supplier=Verical; ComponentLink14URL: https://datasheet.ciiva.com/2985/aba0000ce120-2985437.pdf?src-supplier=Avnet; ComponentLink14Description: https://datasheet.ciiva.com/2985/aba0000ce120-2985437.pdf?src-supplier=Avnet; ComponentLink15URL: https://datasheet.ciiva.com/30173/aba0000ce120-30173071.pdf?src-supplier=Onlinecomponents.com; ComponentLink15Description: https://datasheet.ciiva.com/30173/aba0000ce120-30173071.pdf?src-supplier=Onlinecomponents.com
footprint EEEFK1E680P
pins: 1, 2

## EEE-FK1H220P
designator C?, comment 22uF
CAP ALUM 22UF 20% 50V SMD; Manufacturer: Panasonic; Manufacturer Part Number: EEE-FK1H220P; Item Type: Capacitors; Dielectric Material: 158ConductorMaterial; Ripple Current (AC): 165mA; Impedance: 880mR; Life (Hours): 2000Hour; Leakage Current: 3uA; Dissipation Factor: 10%; Supplier: Mouser; LCSC Part Number: C128458; RoHS: Yes; Stock: 69938; Pricing: 1=0.42, 10=0.227, 50=0.227, 100=0.147, 1000=0.117, 10000=0.098 (USD); Mounting Technology: Surface Mount,PCB; Case/Package: Radial; Pins: 2; Min Operating Temperature: -55°C; Max Operating Temperature: 105°C; Value: 22uF; Tolerance: 20%; Voltage Rating: 50V; Packaging: Tape and Reel; Ripple Current: 165mA; Voltage Rating (DC): 50V; ESR (Equivalent Series Resistance): 880mR; Termination: SMD/SMT; Voltage: 50V; Package Quantity: 1000; Series: FK; Construction: Cylindrical; Diameter: 6.3mm; Length: 5.8mm; Width: 7.8mm; Height: 5.8mm; Ratings: AEC-Q200; Radiation Hardening: No; Reach SVHC Compliant: No; Lead Free: Lead Free; RoHS Compliant: Yes; ComponentLink1URL: https://datasheet.ciiva.com/11777/0900766b80e4e8b0-11777316.pdf?src-supplier=Rs; ComponentLink1Description: https://datasheet.ciiva.com/11777/0900766b80e4e8b0-11777316.pdf?src-supplier=Rs; ComponentLink2URL: https://datasheet.ciiva.com/43463/58258-43463528.pdf?src-supplier=Farnell; ComponentLink2Description: https://datasheet.ciiva.com/43463/58258-43463528.pdf?src-supplier=Farnell; ComponentLink3URL: https://datasheet.ciiva.com/46388/58258-46388569.pdf?src-supplier=Element14; ComponentLink3Description: https://datasheet.ciiva.com/46388/58258-46388569.pdf?src-supplier=Element14; ComponentLink4URL: https://datasheet.ciiva.com/28691/1676921-28691087.pdf?src-supplier=Element14; ComponentLink4Description: https://datasheet.ciiva.com/28691/1676921-28691087.pdf?src-supplier=Element14; ComponentLink5URL: https://datasheet.ciiva.com/24072/aba0000ce120-24072156.pdf?src-supplier=Mouser; ComponentLink5Description: https://datasheet.ciiva.com/24072/aba0000ce120-24072156.pdf?src-supplier=Mouser; ComponentLink6URL: https://datasheet.ciiva.com/14605/70258115-14605607.pdf?src-supplier=Allied+Electronics; ComponentLink6Description: https://datasheet.ciiva.com/14605/70258115-14605607.pdf?src-supplier=Allied+Electronics; ComponentLink7URL: https://datasheet.ciiva.com/14607/70258115-14607833.pdf?src-supplier=Allied+Electronics; ComponentLink7Description: https://datasheet.ciiva.com/14607/70258115-14607833.pdf?src-supplier=Allied+Electronics; ComponentLink8URL: https://datasheet.ciiva.com/43485/1676921-43485511.pdf?src-supplier=Farnell; ComponentLink8Description: https://datasheet.ciiva.com/43485/1676921-43485511.pdf?src-supplier=Farnell; ComponentLink9URL: https://datasheet.ciiva.com/46388/1676921-46388589.pdf?src-supplier=Element14; ComponentLink9Description: https://datasheet.ciiva.com/46388/1676921-46388589.pdf?src-supplier=Element14; ComponentLink10URL: https://datasheet.ciiva.com/6085/1676921-6085161.pdf?src-supplier=Farnell; ComponentLink10Description: https://datasheet.ciiva.com/6085/1676921-6085161.pdf?src-supplier=Farnell; ComponentLink11URL: https://datasheet.ciiva.com/46376/1676921-46376472.pdf?src-supplier=Element14; ComponentLink11Description: https://datasheet.ciiva.com/46376/1676921-46376472.pdf?src-supplier=Element14; ComponentLink12URL: https://datasheet.ciiva.com/16449/aba0000ce120-16449096.pdf?src-supplier=Future+Electronics; ComponentLink12Description: https://datasheet.ciiva.com/16449/aba0000ce120-16449096.pdf?src-supplier=Future+Electronics
footprint EEEFK1H220P
pins: 1, 2

## EEE-FK1J220P
designator C?, comment 22uF
CAP ALUM 22UF 20% 63V SMD; Manufacturer: Panasonic; Manufacturer Part Number: EEE-FK1J220P; Item Type: Capacitor; Material: Aluminium; Ripple Current: 120mA; ESR (Equivalent Series Resistance): 1.2R; Life (Hours): 2000Hour; Leakage Current: 3uA; Dissipation Factor: 8%; Supplier: Mouser; LCSC Part Number: C401723; RoHS: Yes; Stock: 7838; Pricing: 1=0.67, 10=0.451, 50=0.355, 100=0.319, 1000=0.22, 10000=0.197 (USD); Mounting Technology: Surface Mount,PCB; Case/Package: Radial; Dielectric Material: Aluminium; Min Operating Temperature: -55°C; Max Operating Temperature: 105°C; Value: 22uF; Voltage Rating: 63V; Tolerance: 20%; Voltage Rating (DC): 63V; Impedance: 1.2R; Packaging: Tape and Reel; Package Quantity: 1000; Ripple Current (AC): 120mA; Termination: SMD/SMT; Voltage: 63V; Series: FK; Construction: Cylindrical; Voltage Rating (AC): 63V; Diameter: 8mm; Length: 6.2mm; Width: 8.3mm; Height: 6.2mm; Size: 6.2mm; Ratings: AEC-Q200; Radiation Hardening: No; Reach SVHC Compliant: No; Lead Free: Lead Free; RoHS Compliant: Yes; ComponentLink1URL: https://datasheet.ciiva.com/29313/443500-da-01-en-smd-elko-vfk-e-22-uf-63v-29313681.pdf?src-supplier=Conrad; ComponentLink1Description: https://datasheet.ciiva.com/29313/443500-da-01-en-smd-elko-vfk-e-22-uf-63v-29313681.pdf?src-supplier=Conrad; ComponentLink2URL: https://datasheet.ciiva.com/30079/aba0000ce120-30079519.pdf?src-supplier=Onlinecomponents.com; ComponentLink2Description: https://datasheet.ciiva.com/30079/aba0000ce120-30079519.pdf?src-supplier=Onlinecomponents.com; ComponentLink3URL: https://datasheet.ciiva.com/43463/58258-43463535.pdf?src-supplier=Farnell; ComponentLink3Description: https://datasheet.ciiva.com/43463/58258-43463535.pdf?src-supplier=Farnell; ComponentLink4URL: https://datasheet.ciiva.com/46388/58258-46388604.pdf?src-supplier=Element14; ComponentLink4Description: https://datasheet.ciiva.com/46388/58258-46388604.pdf?src-supplier=Element14
footprint EEEFK1J220P
pins: 1, 2

## EEE-FK1K100XP
designator C?, comment 10uF
CAP ALUM 10UF 20% 80V SMD; Manufacturer: Panasonic; Manufacturer Part Number: EEE-FK1K100XP; Item Type: Capacitors; Supplier: Mouser; LCSC Part Number: C178553; RoHS: Yes; Stock: 3728; Pricing: 1=0.68, 10=0.368, 50=0.368, 100=0.277, 1000=0.185, 10000=0.157 (USD); ComponentLink1URL: https://datasheet.ciiva.com/11783/0900766b80e4e8b0-11783480.pdf?src-supplier=Rs; ComponentLink1Description: https://datasheet.ciiva.com/11783/0900766b80e4e8b0-11783480.pdf?src-supplier=Rs; ComponentLink2URL: https://datasheet.ciiva.com/48523/fk-eng-tds-48523894.pdf?src-supplier=Distrelec; ComponentLink2Description: https://datasheet.ciiva.com/48523/fk-eng-tds-48523894.pdf?src-supplier=Distrelec; ComponentLink3URL: https://datasheet.ciiva.com/28670/731857-28670589.pdf?src-supplier=Element14; ComponentLink3Description: https://datasheet.ciiva.com/28670/731857-28670589.pdf?src-supplier=Element14; ComponentLink4URL: https://datasheet.ciiva.com/14602/70258115-14602415.pdf?src-supplier=Allied+Electronics; ComponentLink4Description: https://datasheet.ciiva.com/14602/70258115-14602415.pdf?src-supplier=Allied+Electronics; ComponentLink5URL: https://datasheet.ciiva.com/14606/70258115-14606165.pdf?src-supplier=Allied+Electronics; ComponentLink5Description: https://datasheet.ciiva.com/14606/70258115-14606165.pdf?src-supplier=Allied+Electronics; ComponentLink6URL: https://datasheet.ciiva.com/2985/aba0000ce120-2985457.pdf?src-supplier=Avnet; ComponentLink6Description: https://datasheet.ciiva.com/2985/aba0000ce120-2985457.pdf?src-supplier=Avnet; ComponentLink7URL: https://datasheet.ciiva.com/6121/1676921-6121193.pdf?src-supplier=Farnell; ComponentLink7Description: https://datasheet.ciiva.com/6121/1676921-6121193.pdf?src-supplier=Farnell; ComponentLink8URL: https://datasheet.ciiva.com/15166/getdatasheetpartid-191532-15166315.pdf?src-supplier=Verical; ComponentLink8Description: https://datasheet.ciiva.com/15166/getdatasheetpartid-191532-15166315.pdf?src-supplier=Verical
footprint EEE-FK1K100XP
pins: 1, 2

## EEE-FK2A101AM
designator C?, comment 100uF
CAP ALUM 100UF 20% 100V SMD; Manufacturer: Panasonic; Manufacturer Part Number: EEE-FK2A101AM; Item Type: Capacitor; Ripple Current: 793mA; Impedance: 170mR; Life (Hours): 5000Hour; Dissipation Factor: 0.07%; Supplier: Mouser; LCSC Part Number: C178569; RoHS: Yes; Stock: 2720; Pricing: 1=2.26, 10=1.74, 50=1.49, 100=1.49, 1000=1.13, 10000=0.876 (USD); Mounting Technology: Surface Mount,PCB; Case/Package: Radial; Min Operating Temperature: -55°C; Max Operating Temperature: 105°C; Value: 100uF; Voltage Rating: 100V; Tolerance: 20%; Packaging: Tape and Reel; Package Quantity: 1; Voltage Rating (DC): 100V; ESR (Equivalent Series Resistance): 170mR; Ripple Current (AC): 793mA; Termination: SMD/SMT; Voltage: 100V; Series: FK; Construction: Cylindrical; Diameter: 16mm; Length: 16.5mm; Height: 16.5mm; Height - Seated (Max): 0.65inch; Radiation Hardening: No; Reach SVHC Compliant: No; RoHS Compliant: Yes; Lead Free: 5697LeadFree
footprint EEEFK2A101AM
pins: 1, 2

## EEE-FK2A220P
designator C?, comment 22uF
CAP ALUM 22UF 20% 100V SMD; Manufacturer: Panasonic; Manufacturer Part Number: EEE-FK2A220P; Item Type: Aluminum Electrolytic Capacitors; Material: Aluminium; Ripple Current: 130mA; Life (Hours): 2000Hour; Impedance: 1.3R; Leakage Current: 3uA; Dissipation Factor: 7%; Lead Diameter: 0.9mm; Supplier: Arrow Electronics; LCSC Part Number: C178570; RoHS: Yes; Stock: 22500; Pricing: 500=0.2626, 1000=0.201, 2500=0.199, 3000=0.197, 5000=0.195, 10000=0.193 (USD); Mounting Technology: Surface Mount; Case/Package: Radial; Pins: 2; Min Operating Temperature: -55°C; Max Operating Temperature: 105°C; Value: 22uF; Tolerance: 20%; Voltage Rating: 100V; Ripple Current (AC): 130mA; Packaging: Tape and Reel; Voltage Rating (DC): 100V; ESR (Equivalent Series Resistance): 1.3R; Termination: SMD/SMT; Voltage: 100V; Series: FK; Construction: Cylindrical; Diameter: 8mm; Width: 10mm; Height: 10.2mm; Lead Pitch: 3.1mm; Radiation Hardening: No; Lead Free: Lead Free; RoHS Compliant: Yes; Reach SVHC Compliant: Unknown; ComponentLink1URL: https://datasheet.ciiva.com/11777/0900766b80e4e8b0-11777287.pdf?src-supplier=Rs; ComponentLink1Description: https://datasheet.ciiva.com/11777/0900766b80e4e8b0-11777287.pdf?src-supplier=Rs; ComponentLink2URL: https://datasheet.ciiva.com/29313/443507-da-01-en-smd-elko-vfk-f-22-uf-100v-29313705.pdf?src-supplier=Conrad; ComponentLink2Description: https://datasheet.ciiva.com/29313/443507-da-01-en-smd-elko-vfk-f-22-uf-100v-29313705.pdf?src-supplier=Conrad; ComponentLink3URL: https://datasheet.ciiva.com/46376/1676921-46376746.pdf?src-supplier=Element14; ComponentLink3Description: https://datasheet.ciiva.com/46376/1676921-46376746.pdf?src-supplier=Element14; ComponentLink4URL: https://datasheet.ciiva.com/28670/731857-28670607.pdf?src-supplier=Element14; ComponentLink4Description: https://datasheet.ciiva.com/28670/731857-28670607.pdf?src-supplier=Element14; ComponentLink5URL: https://datasheet.ciiva.com/16201/aba0000ce120-16201928.pdf?src-supplier=Future+Electronics; ComponentLink5Description: https://datasheet.ciiva.com/16201/aba0000ce120-16201928.pdf?src-supplier=Future+Electronics; ComponentLink6URL: https://datasheet.ciiva.com/30264/aba0000ce120-30264855.pdf?src-supplier=Onlinecomponents.com; ComponentLink6Description: https://datasheet.ciiva.com/30264/aba0000ce120-30264855.pdf?src-supplier=Onlinecomponents.com
pins: 1, 2

## EEE-FN1K470UP
designator C?, comment 47uF
CAP ALUM 47UF 20% 80V SMD; Manufacturer: Panasonic; Manufacturer Part Number: EEE-FN1K470UP; Item Type: Capacitors; Dissipation Factor: 8%; ESR (Equivalent Series Resistance): 1.3R; Leakage Current: 37.6uA; Life (Hours): 2000Hour; Ripple Current: 130mA; Supplier: Mouser; LCSC Part Number: C494871; RoHS: No; Stock: 4971; Pricing: 1=0.81, 10=0.516, 50=0.516, 100=0.413, 1000=0.296, 10000=0.249 (USD); Case/Package: Radial; Min Operating Temperature: -55°C; Max Operating Temperature: 105°C; Value: 47uF; Tolerance: 20%; Voltage Rating: 80V; Height: 10.5mm
footprint EEEFN1K470UP
pins: 1, 2

## EEE-FT1E220AR
designator C?, comment 22uF
CAP ALUM 22UF 20% 25V SMD; Manufacturer: Panasonic; Manufacturer Part Number: EEE-FT1E220AR; Item Type: Capacitors; Supplier: Future Electronics; LCSC Part Number: C401767; RoHS: Yes; Stock: 2000; Pricing: 2000=0.104, 4000=0.102, 6000=0.101, 10000=0.0999, 20000=0.0971 (USD); ComponentLink1URL: https://datasheet.ciiva.com/11779/0900766b80f4973e-11779160.pdf?src-supplier=Rs; ComponentLink1Description: https://datasheet.ciiva.com/11779/0900766b80f4973e-11779160.pdf?src-supplier=Rs; ComponentLink2URL: https://datasheet.ciiva.com/28678/1244238-28678933.pdf?src-supplier=Element14; ComponentLink2Description: https://datasheet.ciiva.com/28678/1244238-28678933.pdf?src-supplier=Element14; ComponentLink3URL: https://datasheet.ciiva.com/14595/70243693-14595498.pdf?src-supplier=Allied+Electronics; ComponentLink3Description: https://datasheet.ciiva.com/14595/70243693-14595498.pdf?src-supplier=Allied+Electronics; ComponentLink4URL: https://datasheet.ciiva.com/14597/70243693-14597270.pdf?src-supplier=Allied+Electronics; ComponentLink4Description: https://datasheet.ciiva.com/14597/70243693-14597270.pdf?src-supplier=Allied+Electronics; ComponentLink5URL: https://datasheet.ciiva.com/2985/aba0000ce135-2985586.pdf?src-supplier=Avnet; ComponentLink5Description: https://datasheet.ciiva.com/2985/aba0000ce135-2985586.pdf?src-supplier=Avnet; ComponentLink6URL: https://datasheet.ciiva.com/6085/1790597-6085195.pdf?src-supplier=Farnell; ComponentLink6Description: https://datasheet.ciiva.com/6085/1790597-6085195.pdf?src-supplier=Farnell
footprint EEEFT1E220AR
pins: 1, 2

## EEE-FT1E471GP
designator C?, comment 470uF
CAP ALUM 470UF 20% 25V SMD; Manufacturer: Panasonic; Manufacturer Part Number: EEEFT1E471GP; ESR (Equivalent Series Resistance): 80mR; Polarity: Polar; Ripple Current: 552.5mA; Life (Hours): 5000Hour; Ripple Current (AC): 850mA; Supplier 1: Digi-Key; Stock 1: 0; Pricing 1: 1=1.11, 10=0.847, 50=0.704, 100=0.6061 (USD); Mount: Surface Mount; Case/Package: Radial; Min Operating Temperature: -55°C; Max Operating Temperature: 105°C; Packaging: Cut Tape; Capacitance: 470uF; Voltage Rating: 25V; Tolerance: 20%; Voltage Rating (DC): 25V; Diameter: 8mm; Height: 10.2mm; Height - Seated (Max): 0.413inch; REACH SVHC: No SVHC; RoHS Compliant: Yes; ComponentLink1URL: http://www.farnell.com/datasheets/2813661.pdf?src-supplier=Farnell; ComponentLink1Description: http://www.farnell.com/datasheets/2813661.pdf?src-supplier=Farnell; ComponentLink2URL: http://www.farnell.com/datasheets/2079855.pdf?src-supplier=Element14; ComponentLink2Description: http://www.farnell.com/datasheets/2079855.pdf?src-supplier=Element14; ComponentLink3URL: https://industrial.panasonic.com/cdbs/www-data/pdf/RDE0000/DME0000COL53.pdf?src-supplier=Digi-Key; ComponentLink3Description: https://industrial.panasonic.com/cdbs/www-data/pdf/RDE0000/DME0000COL53.pdf?src-supplier=Digi-Key; ComponentLink4URL: https://industrial.panasonic.com/cdbs/www-data/pdf/RDE0000/DME0000COL41.pdf?src-supplier=Digi-Key; ComponentLink4Description: https://industrial.panasonic.com/cdbs/www-data/pdf/RDE0000/DME0000COL41.pdf?src-supplier=Digi-Key; Supplier Part Number 1: PCE5116CT-ND
footprint EEE-FT1E471GP_
pins: 1, 2